# Altium schematic symbol library 100µF_50V，低阻、105℃、直插_EEUFR1H101.SCHLIB: 1 symbol
Pins are listed as number, name and electrical type; pins without a type are passive.

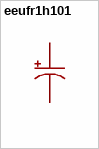
[diagram p0: symbol eeufr1h101]

## eeufr1h101
designator C??  (value not drawn)
容值:100uF;精度:±20%;额定电压:50V;纹波电流:870mA@100kHz;等效串联电阻(ESR):61mΩ@100kHz;; Manufacturer: PANASONIC(松下); AddInBom: yes; ModelId: 5fc21599cab34df2ad7753b19b2f5286; ModelName: CAP-TH_BD8.0-P3.50-D0.6-FD_1; ModelTransform: 315.365,314.914,0,0,0,0,0,0,-196.85; Value: 100uF; Tolerance: ±20%; Voltage Rating: 50V; Pin Spacing: 3.5mm; Lifetime: 6000hrs@105℃; Polarity type: 有极性; Symbol: EEUFR1H101; LCSC Part Name: 100uF ±20% 50V; SupplierPart: C178702; ManufacturerPart: EEUFR1H101; Supplier Footprint: 插件,D8xL11.5mm; JLCPCB Part Class: Extended Part; Datasheet: https://item.szlcsc.com/datasheet/EEUFR1H101/190095.html; Supplier: LCSC; ConvertToPcb: yes; FootprintName: CAP-TH_BD8.0-P3.50-D0.6-FD_1; Ripple Current: 870mA@100kHz; Equivalent Series Resistance(ESR): 61mΩ@100kHz; Diameter: 8mm; Height - Seated (Max): 11.5mm; Operating Temperature: -40℃~+105℃
footprint CAP-TH_BD8.0-P3.50-D0.6-FD_1
pins: 1, 2